# Altium schematic symbol library FXL0630-3R3-M.SchLib: 1 symbol
Pins are listed as number, name and electrical type; pins without a type are passive.

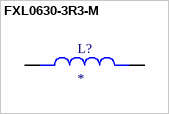
[diagram p0: symbol FXL0630-3R3-M]

## FXL0630-3R3-M
designator L?
Wire Wound Molded SMD Type Power Inductor; MF: Cjiang TW; MP: FXL0630-3R3-M; SnapEDA_Link: https://www.snapeda.com/parts/FXL0630-3R3-M/Cjiang+TW/view-part/?ref=snap; Package: Package; Value: *; Check_prices: https://www.snapeda.com/parts/FXL0630-3R3-M/Cjiang+TW/view-part/?ref=eda
footprint INDM7066X300N
pins: 1, 2